# Altium footprint library PcbLib1.PcbLib: 24 footprints (part 1 of 2)
Each footprint in its own frame and in the unit in brackets; x right, y up, seen from the top. Pads: shape width x height; smd on the part's side, far side on the other; paste and mask are expansions set on the pad; w line width, h text height; cw(c..) or ccw(c..) is an arc to the next point about the centre after c.
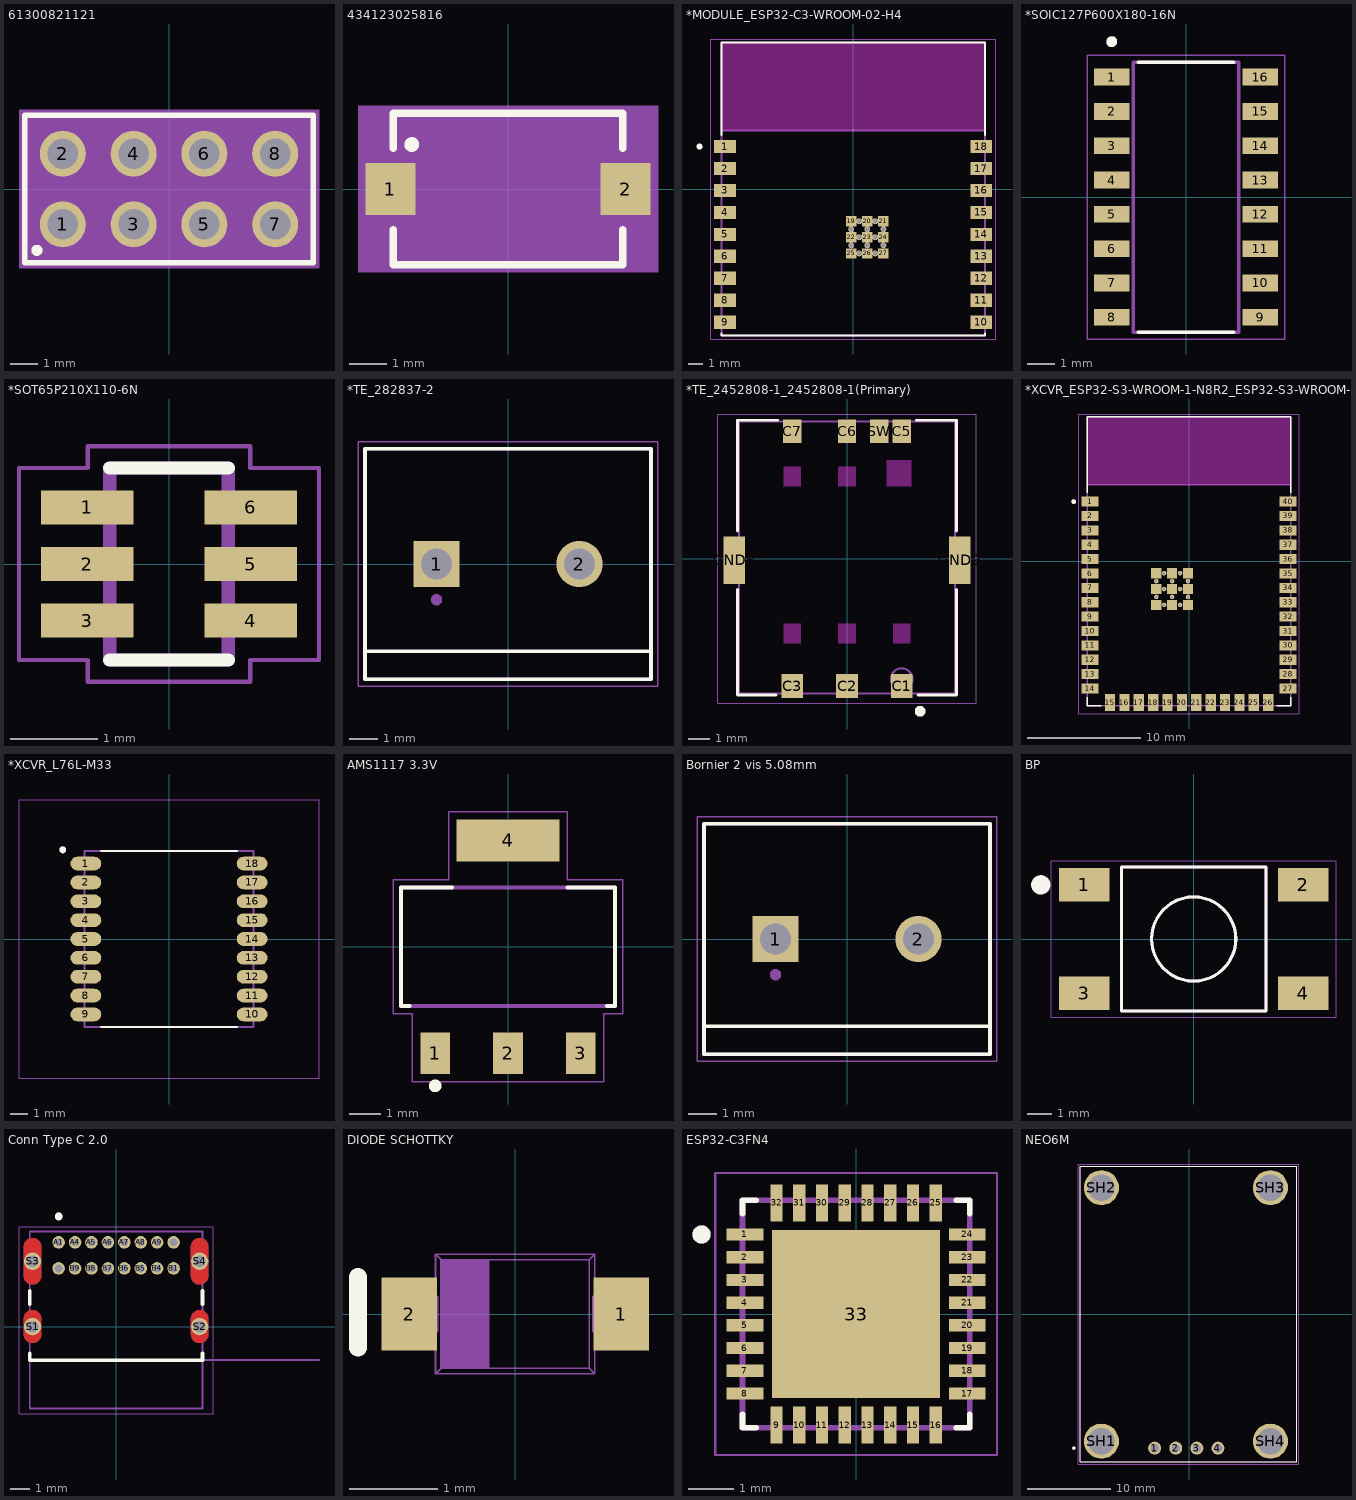
[diagram p0: the footprints below, top view; thin cyan lines are the x and y axes]

## 61300821121 [mm]
pads (8):
  round 1.65 hole 1.1: 1(-3.81,-1.27) 2(-3.81,1.27) 3(-1.27,-1.27) 4(-1.27,1.27) 5(1.27,-1.27) 6(1.27,1.27) 7(3.81,-1.27) 8(3.81,1.27)
Top Overlay:
  circle w0.2: c-4.74,-2.2 r0.1
  lines w0.2: -5.18,-2.64 -5.18,2.64 5.18,2.64 5.18,-2.64 -5.18,-2.64
Mechanical 13:
  lines w0.1: -5.08,-2.54 -5.08,2.54 5.08,2.54 5.08,-2.54 -5.08,-2.54
Mechanical 15:
  region: 5.38,-2.84 -5.38,-2.84 -5.38,2.84 5.38,2.84
3D body "step_temp.STEP": height 8.54, standoff -3, extent -4.953,-2.54 5.207,2.54

## 434123025816 [mm]
pads (2):
  rect 1.35x1.4 smd paste+0 mask+0.102: 1(-3.175,0) 2(3.175,0)
Top Overlay:
  circle w0.2: c-2.6,1.2 r0.1
  lines w0.2: -3.1,-1.1 -3.1,-2.05 3.1,-2.05 3.1,-1.1 ; -3.1,1.1 -3.1,2.05 3.1,2.05 3.1,1.1
Mechanical 13:
  lines w0.1: -3,-1.95 -3,1.95 3,1.95 3,-1.95 -3,-1.95
Mechanical 15:
  region: 4.05,-2.25 -4.05,-2.25 -4.05,2.25 4.05,2.25
3D body "step_temp.STEP": height 2.5, standoff 0, extent -3.5,-1.95 3.5,1.95

## *MODULE_ESP32-C3-WROOM-02-H4 [mm]
pads (39):
  rect 1.5x0.9 smd: 1(-8.75,2.9) 2(-8.75,1.4) 3(-8.75,-0.1) 4(-8.75,-1.6) 5(-8.75,-3.1) 6(-8.75,-4.6) 7(-8.75,-6.1) 8(-8.75,-7.6) 9(-8.75,-9.1) 10(8.75,-9.1) 11(8.75,-7.6) 12(8.75,-6.1) 13(8.75,-4.6) 14(8.75,-3.1) 15(8.75,-1.6) 16(8.75,-0.1) 17(8.75,1.4) 18(8.75,2.9)
  rect 0.7x0.7 smd: 19(-0.14,-2.2) 20(0.96,-2.2) 21(2.06,-2.2) 22(-0.14,-3.3) 23(0.96,-3.3) 24(2.06,-3.3) 25(-0.14,-4.4) 26(0.96,-4.4) 27(2.06,-4.4)
  round 0.4 hole 0.3: 28(0.41,-2.2) 29(1.51,-2.2) 30(-0.14,-2.75) 31(0.96,-2.75) 32(2.06,-2.75) 33(0.41,-3.3) 34(1.51,-3.3) 35(-0.14,-3.85) 36(0.96,-3.85) 37(2.06,-3.85) 38(0.41,-4.4) 39(1.51,-4.4)
Top Overlay:
  circle w0.2: c-10.5,2.9 r0.1
  lines w0.127: -9,-9.87 -9,-10 9,-10 9,-9.87 ; -9,3.67 -9,10 9,10 9,3.67
Keep-Out Layer:
  region: -9,10 9,10 9,4 -9,4
  region: -9,10 9,10 9,4 -9,4
  region: -9,10 9,10 9,4 -9,4
  region: -9,10 9,10 9,4 -9,4
  region: -9,10 9,10 9,4 -9,4
  region: -9,10 9,10 9,4 -9,4
  region: -9,10 9,10 9,4 -9,4
  region: -9,10 9,10 9,4 -9,4
  region: -9,10 9,10 9,4 -9,4
Mechanical 4:
  circle w0.2: c-10.5,2.9 r0.1
  circle w0.2: c-10.5,2.9 r0.1
  lines w0.127: -9,-10 9,-10 ; -9,-10 -9,4 ; -9,-10 9,-10 ; -9,-10 -9,4 ; -9,4 9,4 ; -9,4 -9,10 ; -9,4 9,4 ; -9,4 -9,10 ; -9,10 9,10 ; -9,10 9,10 ; 9,-10 9,4 ; 9,-10 9,4 ; 9,4 9,10 ; 9,4 9,10
Mechanical 16:
  lines w0.05: -9.75,-10.25 9.75,-10.25 9.75,10.25 -9.75,10.25 -9.75,-10.25
3D body "ESP32-C3-WROOM-02-N4--3DModel-STEP-269445.STEP": height 3.35, standoff 0, extent -9,-10 9,10

## *SOIC127P600X180-16N [mm]
pads (16):
  rect 1.31x0.62 smd: 1(-2.75,4.445) 2(-2.75,3.175) 3(-2.75,1.905) 4(-2.75,0.635) 5(-2.75,-0.635) 6(-2.75,-1.905) 7(-2.75,-3.175) 8(-2.75,-4.445) 9(2.75,-4.445) 10(2.75,-3.175) 11(2.75,-1.905) 12(2.75,-0.635) 13(2.75,0.635) 14(2.75,1.905) 15(2.75,3.175) 16(2.75,4.445)
Top Overlay:
  circle w0.2: c-2.75,5.755 r0.1
  lines w0.127: -1.775,-5 1.775,-5 ; -1.775,5 1.775,5
Mechanical 4:
  circle w0.2: c-2.75,5.755 r0.1
  circle w0.2: c-2.75,5.755 r0.1
  lines w0.127: -1.95,-5 1.95,-5 ; -1.95,-5 -1.95,5 ; -1.95,-5 1.95,-5 ; -1.95,-5 -1.95,5 ; -1.95,5 1.95,5 ; -1.95,5 1.95,5 ; 1.95,-5 1.95,5 ; 1.95,-5 1.95,5
Mechanical 16:
  lines w0.05: -3.655,-5.25 3.655,-5.25 3.655,5.25 -3.655,5.25 -3.655,-5.25
3D body "Ch340G--3DModel-STEP-56544.STEP": height 1.8, standoff 0, extent -3,-5 3,5

## *SOT65P210X110-6N [mm]
pads (6):
  rect 1.06x0.39 smd: 1(-0.935,0.65) 2(-0.935,0) 3(-0.935,-0.65) 4(0.935,-0.65) 5(0.935,0) 6(0.935,0.65)
Top Overlay:
  lines w0.152: -0.68,-1.1 0.68,-1.1 ; -0.68,1.1 0.68,1.1
Mechanical 4:
  lines w0.152: -0.68,-1.1 0.68,-1.1 ; -0.68,-1.1 -0.68,1.1 ; -0.68,-1.1 0.68,-1.1 ; -0.68,-1.1 -0.68,1.1 ; -0.68,1.1 0.68,1.1 ; -0.68,1.1 0.68,1.1 ; 0.68,-1.1 0.68,1.1 ; 0.68,-1.1 0.68,1.1
Mechanical 16:
  lines w0.05: -1.72,-1.1 -0.93,-1.1 -0.93,-1.35 0.93,-1.35 0.93,-1.1 1.72,-1.1 1.72,1.1 0.93,1.1 0.93,1.35 -0.93,1.35 -0.93,1.1 -1.72,1.1 -1.72,-1.1
3D body "SMF05CT1G.STEP": height 1.1, standoff 0, extent -1.05,-1 1.05,1

## *TE_282837-2 [mm]
pads (2):
  rect 1.65x1.65 hole 1.1: 1(-2.54,0)
  round 1.65 hole 1.1: 2(2.54,0)
Top Overlay:
  lines w0.127: -5.08,-3.1 -5.08,-4.1 5.08,-4.1 5.08,-3.1 ; -5.08,-3.1 -5.08,4.1 5.08,4.1 5.08,-3.1 ; -5.08,-3.1 5.08,-3.1
Mechanical 4:
  circle w0.2: c-2.54,-1.27 r0.1
  circle w0.2: c-2.54,-1.27 r0.1
  lines w0.127: -5.08,-4.1 5.08,-4.1 ; -5.08,-4.1 -5.08,4.1 ; -5.08,-4.1 5.08,-4.1 ; -5.08,-4.1 -5.08,4.1 ; -5.08,4.1 5.08,4.1 ; -5.08,4.1 5.08,4.1 ; 5.08,-4.1 5.08,4.1 ; 5.08,-4.1 5.08,4.1
Mechanical 16:
  lines w0.05: -5.33,-4.35 5.33,-4.35 5.33,4.35 -5.33,4.35 -5.33,-4.35
3D body "Bornier 2 vis 5.08mm.SLDPRT": height 10.25, standoff -3.25, extent -5.461,-4.191 5.299,4.009

## *TE_2452808-1_2452808-1(Primary) [mm]
pads (9):
  rect 1x1.1 smd: C1(2.54,-5.925) C2(0,-5.925) C3(-2.54,-5.925)
  rect 0.85x1.1 smd: C5(2.54,5.925) C6(0,5.925) C7(-2.54,5.925) SW(1.5,5.925)
  rect 1x2.2 smd: GND8(-5.25,-0.075) GND9(5.25,-0.075)
Top Overlay:
  circle w0.25: c3.4,-7.1 r0.125
  lines w0.127: -5.088,-1.439 -5.088,-6.338 -3.304,-6.338 ; -5.088,1.288 -5.088,6.439 -3.229,6.439 ; 3.229,6.439 5.088,6.439 5.088,1.288 ; 3.304,-6.338 5.088,-6.338 5.088,-1.439
Keep-Out Layer:
  region: -2.94,4.275 -2.14,4.275 -2.14,3.375 -2.94,3.375
  region: -0.4,4.275 0.4,4.275 0.4,3.375 -0.4,3.375
  region: 1.84,4.575 2.99,4.575 2.99,3.375 1.84,3.375
  region: -2.94,-3.025 -2.14,-3.025 -2.14,-3.925 -2.94,-3.925
  region: -0.4,-3.025 0.4,-3.025 0.4,-3.925 -0.4,-3.925
  region: 2.14,-3.025 2.94,-3.025 2.94,-3.925 2.14,-3.925
  region: -2.94,4.275 -2.14,4.275 -2.14,3.375 -2.94,3.375
  region: -0.4,4.275 0.4,4.275 0.4,3.375 -0.4,3.375
  region: 1.84,4.575 2.99,4.575 2.99,3.375 1.84,3.375
  region: -2.94,-3.025 -2.14,-3.025 -2.14,-3.925 -2.94,-3.925
  region: -0.4,-3.025 0.4,-3.025 0.4,-3.925 -0.4,-3.925
  region: 2.14,-3.025 2.94,-3.025 2.94,-3.925 2.14,-3.925
  region: -2.94,4.275 -2.14,4.275 -2.14,3.375 -2.94,3.375
  region: -0.4,4.275 0.4,4.275 0.4,3.375 -0.4,3.375
  region: 1.84,4.575 2.99,4.575 2.99,3.375 1.84,3.375
  region: -2.94,-3.025 -2.14,-3.025 -2.14,-3.925 -2.94,-3.925
  region: -0.4,-3.025 0.4,-3.025 0.4,-3.925 -0.4,-3.925
  region: 2.14,-3.025 2.94,-3.025 2.94,-3.925 2.14,-3.925
  region: -2.94,4.275 -2.14,4.275 -2.14,3.375 -2.94,3.375
  region: -0.4,4.275 0.4,4.275 0.4,3.375 -0.4,3.375
  region: 1.84,4.575 2.99,4.575 2.99,3.375 1.84,3.375
  region: -2.94,-3.025 -2.14,-3.025 -2.14,-3.925 -2.94,-3.925
  region: -0.4,-3.025 0.4,-3.025 0.4,-3.925 -0.4,-3.925
  region: 2.14,-3.025 2.94,-3.025 2.94,-3.925 2.14,-3.925
  region: -2.94,4.275 -2.14,4.275 -2.14,3.375 -2.94,3.375
  region: -0.4,4.275 0.4,4.275 0.4,3.375 -0.4,3.375
  region: 1.84,4.575 2.99,4.575 2.99,3.375 1.84,3.375
  region: -2.94,-3.025 -2.14,-3.025 -2.14,-3.925 -2.94,-3.925
  region: -0.4,-3.025 0.4,-3.025 0.4,-3.925 -0.4,-3.925
  region: 2.14,-3.025 2.94,-3.025 2.94,-3.925 2.14,-3.925
  region: -2.94,4.275 -2.14,4.275 -2.14,3.375 -2.94,3.375
  region: -0.4,4.275 0.4,4.275 0.4,3.375 -0.4,3.375
  region: 1.84,4.575 2.99,4.575 2.99,3.375 1.84,3.375
  region: -2.94,-3.025 -2.14,-3.025 -2.14,-3.925 -2.94,-3.925
  region: -0.4,-3.025 0.4,-3.025 0.4,-3.925 -0.4,-3.925
  region: 2.14,-3.025 2.94,-3.025 2.94,-3.925 2.14,-3.925
Mechanical 4:
  circle w0.1: c2.54,-5.6 r0.5
  circle w0.1: c2.54,-5.6 r0.5
  lines w0.1: -5.025,-6.275 5.025,-6.275 ; -5.025,-6.275 -5.025,6.375 ; -5.025,-6.275 5.025,-6.275 ; -5.025,-6.275 -5.025,6.375 ; -5.025,6.375 5.025,6.375 ; -5.025,6.375 5.025,6.375 ; 5.025,-6.275 5.025,6.375 ; 5.025,-6.275 5.025,6.375
Mechanical 16:
  lines w0.05: -6,-6.725 -6,6.725 6,6.725 6,-6.725 -6,-6.725
3D body "Slot Nano SIM.zip.STEP": height 1.37, standoff 0, extent -5.425,-5.869 5.425,6.581

## *XCVR_ESP32-S3-WROOM-1-N8R2_ESP32-S3-WROOM-1-N8R2(Primary) [mm]
pads (61):
  rect 1.5x0.9 smd: 1(-8.75,5.26) 2(-8.75,3.99) 3(-8.75,2.72) 4(-8.75,1.45) 5(-8.75,0.18) 6(-8.75,-1.09) 7(-8.75,-2.36) 8(-8.75,-3.63) 9(-8.75,-4.9) 10(-8.75,-6.17) 11(-8.75,-7.44) 12(-8.75,-8.71) 13(-8.75,-9.98) 14(-8.75,-11.25) 27(8.75,-11.25) 28(8.75,-9.98) 29(8.75,-8.71) 30(8.75,-7.44) 31(8.75,-6.17) 32(8.75,-4.9) 33(8.75,-3.63) 34(8.75,-2.36) 35(8.75,-1.09) 36(8.75,0.18) 37(8.75,1.45) 38(8.75,2.72) 39(8.75,3.99) 40(8.75,5.26)
  rect 0.9x1.5 smd: 15(-6.985,-12.5) 16(-5.715,-12.5) 17(-4.445,-12.5) 18(-3.175,-12.5) 19(-1.905,-12.5) 20(-0.635,-12.5) 21(0.635,-12.5) 22(1.905,-12.5) 23(3.175,-12.5) 24(4.445,-12.5) 25(5.715,-12.5) 26(6.985,-12.5)
  rect 0.9x0.9 smd: 41_1(-1.5,-2.46) 41_2(-2.9,-2.46) 41_3(-0.1,-2.46) 41_4(-2.9,-3.86) 41_5(-1.5,-3.86) 41_6(-0.1,-3.86) 41_7(-2.9,-1.06) 41_8(-1.5,-1.06) 41_9(-0.1,-1.06)
  round 0.4 hole 0.2: 41_10(-1.5,-1.76) 41_11(-2.9,-1.76) 41_12(-0.1,-1.76) 41_13(-2.9,-3.16) 41_14(-1.5,-3.16) 41_15(-0.1,-3.16) 41_16(-2.2,-1.06) 41_17(-0.8,-1.06) 41_18(-2.2,-2.46) 41_19(-0.8,-2.46) 41_20(-2.2,-3.86) 41_21(-0.8,-3.86)
Top Overlay:
  circle w0.2: c-10.2,5.26 r0.1
  lines w0.127: -9,-12.02 -9,-12.75 -7.755,-12.75 ; -9,6.03 -9,12.75 9,12.75 9,6.03 ; 7.755,-12.75 9,-12.75 9,-12.02
Keep-Out Layer:
  region: -9,12.75 9,12.75 9,6.75 -9,6.75
  region: -9,12.75 9,12.75 9,6.75 -9,6.75
  region: -9,12.75 9,12.75 9,6.75 -9,6.75
  region: -9,12.75 9,12.75 9,6.75 -9,6.75
  region: -9,12.75 9,12.75 9,6.75 -9,6.75
  region: -9,12.75 9,12.75 9,6.75 -9,6.75
  region: -9,12.75 9,12.75 9,6.75 -9,6.75
  region: -9,12.75 9,12.75 9,6.75 -9,6.75
  region: -9,12.75 9,12.75 9,6.75 -9,6.75
Mechanical 4:
  circle w0.2: c-10.2,5.26 r0.1
  circle w0.2: c-10.2,5.26 r0.1
  lines w0.127: -9,-12.75 -9,6.75 ; -9,-12.75 9,-12.75 ; -9,-12.75 -9,6.75 ; -9,-12.75 9,-12.75 ; -9,6.75 9,6.75 ; -9,6.75 -9,12.75 ; -9,6.75 9,6.75 ; -9,6.75 -9,12.75 ; -9,12.75 9,12.75 ; -9,12.75 9,12.75 ; 9,-12.75 9,6.75 ; 9,-12.75 9,6.75 ; 9,6.75 9,12.75 ; 9,6.75 9,12.75
  text "ANTENNA" at -4.5,9.25 h1.88
  text "ANTENNA" at -4.5,9.25 h1.88
Mechanical 16:
  lines w0.05: -9.75,-13.5 9.75,-13.5 9.75,13 -9.75,13 -9.75,-13.5
3D body "ESP32-S3-WROOM-1-N8R2--3DModel-STEP-56544.STEP": height 3.25, standoff 0, extent -9,-12.75 9,12.75

## *XCVR_L76L-M33 [mm]
pads (18):
  oval 1.8x0.8 smd: 1(-4.85,4.4) 2(-4.85,3.3) 3(-4.85,2.2) 4(-4.85,1.1) 5(-4.85,0) 6(-4.85,-1.1) 7(-4.85,-2.2) 8(-4.85,-3.3) 9(-4.85,-4.4) 10(4.85,-4.4) 11(4.85,-3.3) 12(4.85,-2.2) 13(4.85,-1.1) 14(4.85,0) 15(4.85,1.1) 16(4.85,2.2) 17(4.85,3.3) 18(4.85,4.4)
Top Overlay:
  circle w0.2: c-6.2,5.2 r0.1
  lines w0.127: -3.95,-5.125 3.95,-5.125 ; -3.95,5.125 3.95,5.125
Top Paste:
  drawing of 18 lines, arcs and shapes, not listed
Mechanical 4:
  circle w0.2: c-6.2,5.2 r0.1
  circle w0.2: c-6.2,5.2 r0.1
  lines w0.127: -4.925,-5.125 -4.925,5.125 ; -4.925,-5.125 4.925,-5.125 ; -4.925,-5.125 -4.925,5.125 ; -4.925,-5.125 4.925,-5.125 ; -4.925,5.125 4.925,5.125 ; -4.925,5.125 4.925,5.125 ; 4.925,-5.125 4.925,5.125 ; 4.925,-5.125 4.925,5.125
Mechanical 16:
  lines w0.05: -8.75,-8.125 8.75,-8.125 8.75,8.125 -8.75,8.125 -8.75,-8.125
3D body "L76L-M33.STEP": height 2.49, standoff 0, extent -4.85,-5.05 4.85,5.05

## AMS1117 3.3V [mm]
pads (4):
  rect 0.93x1.31 smd: 1(-2.29,-3.345) 2(0,-3.345) 3(2.29,-3.345)
  rect 3.24x1.31 smd: 4(0,3.345)
Top Overlay:
  circle w0.2: c-2.29,-4.373 r0.1
  lines w0.127: -3.1,-1.86 -3.36,-1.86 -3.36,1.86 -1.76,1.86 ; 1.87,1.86 3.36,1.86 3.36,-1.86 3.11,-1.86
Mechanical 4:
  lines w0.127: -3.36,-1.86 -3.36,1.86 ; -3.36,-1.86 3.36,-1.86 ; -3.36,-1.86 -3.36,1.86 ; -3.36,-1.86 3.36,-1.86 ; -3.36,1.86 3.36,1.86 ; -3.36,1.86 3.36,1.86 ; 3.36,-1.86 3.36,1.86 ; 3.36,-1.86 3.36,1.86
Mechanical 16:
  lines w0.05: -3.61,-2.11 -3.61,2.11 -1.87,2.11 -1.87,4.25 1.87,4.25 1.87,2.11 3.61,2.11 3.61,-2.11 3.01,-2.11 3.01,-4.25 -3.01,-4.25 -3.01,-2.11 -3.61,-2.11
3D body "AMS1117-3.3 (1).STEP": height 1.8, standoff 0, extent -3.15,-3.5 3.15,3.5

## Bornier 2 vis 5.08mm [mm]
pads (2):
  rect 1.65x1.65 hole 1.1: 1(-2.54,0)
  round 1.65 hole 1.1: 2(2.54,0)
Top Overlay:
  lines w0.127: -5.08,-3.1 5.08,-3.1 ; -5.08,-3.1 -5.08,4.1 5.08,4.1 5.08,-3.1 ; -5.08,-3.1 -5.08,-4.1 5.08,-4.1 5.08,-3.1
Mechanical 4:
  circle w0.2: c-2.54,-1.27 r0.1
  circle w0.2: c-2.54,-1.27 r0.1
  lines w0.127: -5.08,-4.1 -5.08,4.1 ; -5.08,-4.1 5.08,-4.1 ; -5.08,-4.1 -5.08,4.1 ; -5.08,-4.1 5.08,-4.1 ; -5.08,4.1 5.08,4.1 ; -5.08,4.1 5.08,4.1 ; 5.08,-4.1 5.08,4.1 ; 5.08,-4.1 5.08,4.1
Mechanical 16:
  lines w0.05: -5.33,-4.35 -5.33,4.35 5.33,4.35 5.33,-4.35 -5.33,-4.35
3D body "Bornier 2 vis 5.08mm.SLDPRT": height 10.25, standoff -3.25, extent -5.461,-4.191 5.299,4.009

## BP [mm]
pads (4):
  rect 2.1x1.4 smd: 1(-4.55,2.25) 2(4.55,2.25) 3(-4.55,-2.25) 4(4.55,-2.25)
Top Overlay:
  circle w0.127: c0,0 r1.75
  circle w0.4: c-6.35,2.25 r0.2
  lines w0.127: -3,-2.997 -3,3 3,3 3,-3 -2.992,-3
Mechanical 4:
  circle w0.127: c0,0 r1.75
  circle w0.127: c0,0 r1.75
  lines w0.127: -3,-3 3,-3 ; -3,-3 -3,3 ; -3,-3 3,-3 ; -3,-3 -3,3 ; -3,3 3,3 ; -3,3 3,3 ; 3,-3 3,3 ; 3,-3 3,3
Mechanical 16:
  lines w0.05: -5.914,-3.25 5.914,-3.25 5.914,3.25 -5.914,3.25 -5.914,-3.25
3D body "4-1437565-1--3DModel-STEP-56544.STEP": height 5.38, standoff 0, extent -5.047,-3 4.953,3

## Conn Type C 2.0 [mm] "*GCT_USB4085-GF-A_REVA4_USB4085-GF-A_REVA4(Primary)"
pads (20):
  round 0.65 hole 0.4: A1(-2.975,4.36) A4(-2.125,4.36) A5(-1.275,4.36) A6(-0.425,4.36) A7(0.425,4.36) A8(1.275,4.36) A9(2.125,4.36) A12(2.975,4.36) B1(2.975,3.01) B4(2.125,3.01) B5(1.275,3.01) B6(0.425,3.01) B7(-0.425,3.01) B8(-1.275,3.01) B9(-2.125,3.01) B12(-2.975,3.01)
  round 0.9 hole 0.6: S1(-4.325,0) S2(4.325,0) S3(-4.325,3.38) S4(4.325,3.38)
Top Layer:
  region: 4.775,4.13 4.775,2.63 4.774,2.606 4.773,2.583 4.769,2.56 4.765,2.536 4.76,2.514 4.753,2.491 4.745,2.469 4.736,2.447 4.726,2.426 4.715,2.405 4.702,2.385 4.689,2.365 4.675,2.347 4.659,2.329 4.643,2.312 4.626,2.296 4.608,2.28 4.59,2.266 4.57,2.253 4.55,2.24 4.529,2.229 4.508,2.219 4.486,2.21 4.464,2.202 4.441,2.195 4.419,2.19 4.395,2.186 4.372,2.182 4.349,2.181 4.325,2.18 4.301,2.181 4.278,2.182 4.255,2.186 4.231,2.19 4.209,2.195 4.186,2.202 4.164,2.21 4.142,2.219 4.121,2.229 4.1,2.24 4.08,2.253 4.06,2.266 4.042,2.28 4.024,2.296 4.007,2.312 3.991,2.329 3.975,2.347 3.961,2.365 3.948,2.385 3.935,2.405 3.924,2.426 3.914,2.447 3.905,2.469 3.897,2.491 3.89,2.514 3.885,2.536 3.881,2.56 3.877,2.583 3.876,2.606 3.875,2.63 3.875,4.13 3.876,4.154 3.877,4.177 3.881,4.2 3.885,4.224 3.89,4.246 3.897,4.269 3.905,4.291 3.914,4.313 3.924,4.334 3.935,4.355 3.948,4.375 3.961,4.394 3.975,4.413 3.991,4.431 4.007,4.448 4.024,4.464 4.042,4.48 4.06,4.494 4.08,4.507 4.1,4.52 4.121,4.531 4.142,4.541 4.164,4.55 4.186,4.558 4.209,4.565 4.231,4.57 4.255,4.574 4.278,4.578 4.301,4.579 4.325,4.58 4.349,4.579 4.372,4.578 4.395,4.574 4.419,4.57 4.441,4.565 4.464,4.558 4.486,4.55 4.508,4.541 4.529,4.531 4.55,4.52 4.57,4.507 4.59,4.494 4.608,4.48 4.626,4.464 4.643,4.448 4.659,4.431 4.675,4.413 4.689,4.394 4.702,4.375 4.715,4.355 4.726,4.334 4.736,4.313 4.745,4.291 4.753,4.269 4.76,4.246 4.765,4.224 4.769,4.2 4.773,4.177 4.774,4.154
  region: -3.875,4.13 -3.875,2.63 -3.876,2.606 -3.877,2.583 -3.881,2.56 -3.885,2.536 -3.89,2.514 -3.897,2.491 -3.905,2.469 -3.914,2.447 -3.924,2.426 -3.935,2.405 -3.948,2.385 -3.961,2.365 -3.975,2.347 -3.991,2.329 -4.007,2.312 -4.024,2.296 -4.042,2.28 -4.06,2.266 -4.08,2.253 -4.1,2.24 -4.121,2.229 -4.142,2.219 -4.164,2.21 -4.186,2.202 -4.209,2.195 -4.231,2.19 -4.255,2.186 -4.278,2.182 -4.301,2.181 -4.325,2.18 -4.349,2.181 -4.372,2.182 -4.395,2.186 -4.419,2.19 -4.441,2.195 -4.464,2.202 -4.486,2.21 -4.508,2.219 -4.529,2.229 -4.55,2.24 -4.57,2.253 -4.59,2.266 -4.608,2.28 -4.626,2.296 -4.643,2.312 -4.659,2.329 -4.675,2.347 -4.689,2.365 -4.702,2.385 -4.715,2.405 -4.726,2.426 -4.736,2.447 -4.745,2.469 -4.753,2.491 -4.76,2.514 -4.765,2.536 -4.769,2.56 -4.773,2.583 -4.774,2.606 -4.775,2.63 -4.775,4.13 -4.774,4.154 -4.773,4.177 -4.769,4.2 -4.765,4.224 -4.76,4.246 -4.753,4.269 -4.745,4.291 -4.736,4.313 -4.726,4.334 -4.715,4.355 -4.702,4.375 -4.689,4.394 -4.675,4.413 -4.659,4.431 -4.643,4.448 -4.626,4.464 -4.608,4.48 -4.59,4.494 -4.57,4.507 -4.55,4.52 -4.529,4.531 -4.508,4.541 -4.486,4.55 -4.464,4.558 -4.441,4.565 -4.419,4.57 -4.395,4.574 -4.372,4.578 -4.349,4.579 -4.325,4.58 -4.301,4.579 -4.278,4.578 -4.255,4.574 -4.231,4.57 -4.209,4.565 -4.186,4.558 -4.164,4.55 -4.142,4.541 -4.121,4.531 -4.1,4.52 -4.08,4.507 -4.06,4.494 -4.042,4.48 -4.024,4.464 -4.007,4.448 -3.991,4.431 -3.975,4.413 -3.961,4.394 -3.948,4.375 -3.935,4.355 -3.924,4.334 -3.914,4.313 -3.905,4.291 -3.897,4.269 -3.89,4.246 -3.885,4.224 -3.881,4.2 -3.877,4.177 -3.876,4.154
  region: 4.775,0.4 4.775,-0.4 4.774,-0.424 4.773,-0.447 4.769,-0.47 4.765,-0.494 4.76,-0.516 4.753,-0.539 4.745,-0.561 4.736,-0.583 4.726,-0.604 4.715,-0.625 4.702,-0.645 4.689,-0.665 4.675,-0.683 4.659,-0.701 4.643,-0.718 4.626,-0.734 4.608,-0.75 4.59,-0.764 4.57,-0.777 4.55,-0.79 4.529,-0.801 4.508,-0.811 4.486,-0.82 4.464,-0.828 4.441,-0.835 4.419,-0.84 4.395,-0.844 4.372,-0.848 4.349,-0.849 4.325,-0.85 4.301,-0.849 4.278,-0.848 4.255,-0.844 4.231,-0.84 4.209,-0.835 4.186,-0.828 4.164,-0.82 4.142,-0.811 4.121,-0.801 4.1,-0.79 4.08,-0.777 4.06,-0.764 4.042,-0.75 4.024,-0.734 4.007,-0.718 3.991,-0.701 3.975,-0.683 3.961,-0.665 3.948,-0.645 3.935,-0.625 3.924,-0.604 3.914,-0.583 3.905,-0.561 3.897,-0.539 3.89,-0.516 3.885,-0.494 3.881,-0.47 3.877,-0.447 3.876,-0.424 3.875,-0.4 3.875,0.4 3.876,0.424 3.877,0.447 3.881,0.47 3.885,0.494 3.89,0.516 3.897,0.539 3.905,0.561 3.914,0.583 3.924,0.604 3.935,0.625 3.948,0.645 3.961,0.665 3.975,0.683 3.991,0.701 4.007,0.718 4.024,0.734 4.042,0.75 4.06,0.764 4.08,0.777 4.1,0.79 4.121,0.801 4.142,0.811 4.164,0.82 4.186,0.828 4.209,0.835 4.231,0.84 4.255,0.844 4.278,0.848 4.301,0.849 4.325,0.85 4.349,0.849 4.372,0.848 4.395,0.844 4.419,0.84 4.441,0.835 4.464,0.828 4.486,0.82 4.508,0.811 4.529,0.801 4.55,0.79 4.57,0.777 4.59,0.764 4.608,0.75 4.626,0.734 4.643,0.718 4.659,0.701 4.675,0.683 4.689,0.665 4.702,0.645 4.715,0.625 4.726,0.604 4.736,0.583 4.745,0.561 4.753,0.539 4.76,0.516 4.765,0.494 4.769,0.47 4.773,0.447 4.774,0.424
  region: -3.875,0.4 -3.875,-0.4 -3.876,-0.424 -3.877,-0.447 -3.881,-0.47 -3.885,-0.494 -3.89,-0.516 -3.897,-0.539 -3.905,-0.561 -3.914,-0.583 -3.924,-0.604 -3.935,-0.625 -3.948,-0.645 -3.961,-0.665 -3.975,-0.683 -3.991,-0.701 -4.007,-0.718 -4.024,-0.734 -4.042,-0.75 -4.06,-0.764 -4.08,-0.777 -4.1,-0.79 -4.121,-0.801 -4.142,-0.811 -4.164,-0.82 -4.186,-0.828 -4.209,-0.835 -4.231,-0.84 -4.255,-0.844 -4.278,-0.848 -4.301,-0.849 -4.325,-0.85 -4.349,-0.849 -4.372,-0.848 -4.395,-0.844 -4.419,-0.84 -4.441,-0.835 -4.464,-0.828 -4.486,-0.82 -4.508,-0.811 -4.529,-0.801 -4.55,-0.79 -4.57,-0.777 -4.59,-0.764 -4.608,-0.75 -4.626,-0.734 -4.643,-0.718 -4.659,-0.701 -4.675,-0.683 -4.689,-0.665 -4.702,-0.645 -4.715,-0.625 -4.726,-0.604 -4.736,-0.583 -4.745,-0.561 -4.753,-0.539 -4.76,-0.516 -4.765,-0.494 -4.769,-0.47 -4.773,-0.447 -4.774,-0.424 -4.775,-0.4 -4.775,0.4 -4.774,0.424 -4.773,0.447 -4.769,0.47 -4.765,0.494 -4.76,0.516 -4.753,0.539 -4.745,0.561 -4.736,0.583 -4.726,0.604 -4.715,0.625 -4.702,0.645 -4.689,0.665 -4.675,0.683 -4.659,0.701 -4.643,0.718 -4.626,0.734 -4.608,0.75 -4.59,0.764 -4.57,0.777 -4.55,0.79 -4.529,0.801 -4.508,0.811 -4.486,0.82 -4.464,0.828 -4.441,0.835 -4.419,0.84 -4.395,0.844 -4.372,0.848 -4.349,0.849 -4.325,0.85 -4.301,0.849 -4.278,0.848 -4.255,0.844 -4.231,0.84 -4.209,0.835 -4.186,0.828 -4.164,0.82 -4.142,0.811 -4.121,0.801 -4.1,0.79 -4.08,0.777 -4.06,0.764 -4.042,0.75 -4.024,0.734 -4.007,0.718 -3.991,0.701 -3.975,0.683 -3.961,0.665 -3.948,0.645 -3.935,0.625 -3.924,0.604 -3.914,0.583 -3.905,0.561 -3.897,0.539 -3.89,0.516 -3.885,0.494 -3.881,0.47 -3.877,0.447 -3.876,0.424
Bottom Layer:
  region: 3.875,4.13 3.875,2.63 3.876,2.606 3.877,2.583 3.881,2.56 3.885,2.536 3.89,2.514 3.897,2.491 3.905,2.469 3.914,2.447 3.924,2.426 3.935,2.405 3.948,2.385 3.961,2.365 3.975,2.347 3.991,2.329 4.007,2.312 4.024,2.296 4.042,2.28 4.06,2.266 4.08,2.253 4.1,2.24 4.121,2.229 4.142,2.219 4.164,2.21 4.186,2.202 4.209,2.195 4.231,2.19 4.255,2.186 4.278,2.182 4.301,2.181 4.325,2.18 4.349,2.181 4.372,2.182 4.395,2.186 4.419,2.19 4.441,2.195 4.464,2.202 4.486,2.21 4.508,2.219 4.529,2.229 4.55,2.24 4.57,2.253 4.59,2.266 4.608,2.28 4.626,2.296 4.643,2.312 4.659,2.329 4.675,2.347 4.689,2.365 4.702,2.385 4.715,2.405 4.726,2.426 4.736,2.447 4.745,2.469 4.753,2.491 4.76,2.514 4.765,2.536 4.769,2.56 4.773,2.583 4.774,2.606 4.775,2.63 4.775,4.13 4.774,4.154 4.773,4.177 4.769,4.2 4.765,4.224 4.76,4.246 4.753,4.269 4.745,4.291 4.736,4.313 4.726,4.334 4.715,4.355 4.702,4.375 4.689,4.394 4.675,4.413 4.659,4.431 4.643,4.448 4.626,4.464 4.608,4.48 4.59,4.494 4.57,4.507 4.55,4.52 4.529,4.531 4.508,4.541 4.486,4.55 4.464,4.558 4.441,4.565 4.419,4.57 4.395,4.574 4.372,4.578 4.349,4.579 4.325,4.58 4.301,4.579 4.278,4.578 4.255,4.574 4.231,4.57 4.209,4.565 4.186,4.558 4.164,4.55 4.142,4.541 4.121,4.531 4.1,4.52 4.08,4.507 4.06,4.494 4.042,4.48 4.024,4.464 4.007,4.448 3.991,4.431 3.975,4.413 3.961,4.394 3.948,4.375 3.935,4.355 3.924,4.334 3.914,4.313 3.905,4.291 3.897,4.269 3.89,4.246 3.885,4.224 3.881,4.2 3.877,4.177 3.876,4.154
  region: -4.775,4.13 -4.775,2.63 -4.774,2.606 -4.773,2.583 -4.769,2.56 -4.765,2.536 -4.76,2.514 -4.753,2.491 -4.745,2.469 -4.736,2.447 -4.726,2.426 -4.715,2.405 -4.702,2.385 -4.689,2.365 -4.675,2.347 -4.659,2.329 -4.643,2.312 -4.626,2.296 -4.608,2.28 -4.59,2.266 -4.57,2.253 -4.55,2.24 -4.529,2.229 -4.508,2.219 -4.486,2.21 -4.464,2.202 -4.441,2.195 -4.419,2.19 -4.395,2.186 -4.372,2.182 -4.349,2.181 -4.325,2.18 -4.301,2.181 -4.278,2.182 -4.255,2.186 -4.231,2.19 -4.209,2.195 -4.186,2.202 -4.164,2.21 -4.142,2.219 -4.121,2.229 -4.1,2.24 -4.08,2.253 -4.06,2.266 -4.042,2.28 -4.024,2.296 -4.007,2.312 -3.991,2.329 -3.975,2.347 -3.961,2.365 -3.948,2.385 -3.935,2.405 -3.924,2.426 -3.914,2.447 -3.905,2.469 -3.897,2.491 -3.89,2.514 -3.885,2.536 -3.881,2.56 -3.877,2.583 -3.876,2.606 -3.875,2.63 -3.875,4.13 -3.876,4.154 -3.877,4.177 -3.881,4.2 -3.885,4.224 -3.89,4.246 -3.897,4.269 -3.905,4.291 -3.914,4.313 -3.924,4.334 -3.935,4.355 -3.948,4.375 -3.961,4.394 -3.975,4.413 -3.991,4.431 -4.007,4.448 -4.024,4.464 -4.042,4.48 -4.06,4.494 -4.08,4.507 -4.1,4.52 -4.121,4.531 -4.142,4.541 -4.164,4.55 -4.186,4.558 -4.209,4.565 -4.231,4.57 -4.255,4.574 -4.278,4.578 -4.301,4.579 -4.325,4.58 -4.349,4.579 -4.372,4.578 -4.395,4.574 -4.419,4.57 -4.441,4.565 -4.464,4.558 -4.486,4.55 -4.508,4.541 -4.529,4.531 -4.55,4.52 -4.57,4.507 -4.59,4.494 -4.608,4.48 -4.626,4.464 -4.643,4.448 -4.659,4.431 -4.675,4.413 -4.689,4.394 -4.702,4.375 -4.715,4.355 -4.726,4.334 -4.736,4.313 -4.745,4.291 -4.753,4.269 -4.76,4.246 -4.765,4.224 -4.769,4.2 -4.773,4.177 -4.774,4.154
  region: 3.875,0.4 3.875,-0.4 3.876,-0.424 3.877,-0.447 3.881,-0.47 3.885,-0.494 3.89,-0.516 3.897,-0.539 3.905,-0.561 3.914,-0.583 3.924,-0.604 3.935,-0.625 3.948,-0.645 3.961,-0.665 3.975,-0.683 3.991,-0.701 4.007,-0.718 4.024,-0.734 4.042,-0.75 4.06,-0.764 4.08,-0.777 4.1,-0.79 4.121,-0.801 4.142,-0.811 4.164,-0.82 4.186,-0.828 4.209,-0.835 4.231,-0.84 4.255,-0.844 4.278,-0.848 4.301,-0.849 4.325,-0.85 4.349,-0.849 4.372,-0.848 4.395,-0.844 4.419,-0.84 4.441,-0.835 4.464,-0.828 4.486,-0.82 4.508,-0.811 4.529,-0.801 4.55,-0.79 4.57,-0.777 4.59,-0.764 4.608,-0.75 4.626,-0.734 4.643,-0.718 4.659,-0.701 4.675,-0.683 4.689,-0.665 4.702,-0.645 4.715,-0.625 4.726,-0.604 4.736,-0.583 4.745,-0.561 4.753,-0.539 4.76,-0.516 4.765,-0.494 4.769,-0.47 4.773,-0.447 4.774,-0.424 4.775,-0.4 4.775,0.4 4.774,0.424 4.773,0.447 4.769,0.47 4.765,0.494 4.76,0.516 4.753,0.539 4.745,0.561 4.736,0.583 4.726,0.604 4.715,0.625 4.702,0.645 4.689,0.665 4.675,0.683 4.659,0.701 4.643,0.718 4.626,0.734 4.608,0.75 4.59,0.764 4.57,0.777 4.55,0.79 4.529,0.801 4.508,0.811 4.486,0.82 4.464,0.828 4.441,0.835 4.419,0.84 4.395,0.844 4.372,0.848 4.349,0.849 4.325,0.85 4.301,0.849 4.278,0.848 4.255,0.844 4.231,0.84 4.209,0.835 4.186,0.828 4.164,0.82 4.142,0.811 4.121,0.801 4.1,0.79 4.08,0.777 4.06,0.764 4.042,0.75 4.024,0.734 4.007,0.718 3.991,0.701 3.975,0.683 3.961,0.665 3.948,0.645 3.935,0.625 3.924,0.604 3.914,0.583 3.905,0.561 3.897,0.539 3.89,0.516 3.885,0.494 3.881,0.47 3.877,0.447 3.876,0.424
  region: -4.775,0.4 -4.775,-0.4 -4.774,-0.424 -4.773,-0.447 -4.769,-0.47 -4.765,-0.494 -4.76,-0.516 -4.753,-0.539 -4.745,-0.561 -4.736,-0.583 -4.726,-0.604 -4.715,-0.625 -4.702,-0.645 -4.689,-0.665 -4.675,-0.683 -4.659,-0.701 -4.643,-0.718 -4.626,-0.734 -4.608,-0.75 -4.59,-0.764 -4.57,-0.777 -4.55,-0.79 -4.529,-0.801 -4.508,-0.811 -4.486,-0.82 -4.464,-0.828 -4.441,-0.835 -4.419,-0.84 -4.395,-0.844 -4.372,-0.848 -4.349,-0.849 -4.325,-0.85 -4.301,-0.849 -4.278,-0.848 -4.255,-0.844 -4.231,-0.84 -4.209,-0.835 -4.186,-0.828 -4.164,-0.82 -4.142,-0.811 -4.121,-0.801 -4.1,-0.79 -4.08,-0.777 -4.06,-0.764 -4.042,-0.75 -4.024,-0.734 -4.007,-0.718 -3.991,-0.701 -3.975,-0.683 -3.961,-0.665 -3.948,-0.645 -3.935,-0.625 -3.924,-0.604 -3.914,-0.583 -3.905,-0.561 -3.897,-0.539 -3.89,-0.516 -3.885,-0.494 -3.881,-0.47 -3.877,-0.447 -3.876,-0.424 -3.875,-0.4 -3.875,0.4 -3.876,0.424 -3.877,0.447 -3.881,0.47 -3.885,0.494 -3.89,0.516 -3.897,0.539 -3.905,0.561 -3.914,0.583 -3.924,0.604 -3.935,0.625 -3.948,0.645 -3.961,0.665 -3.975,0.683 -3.991,0.701 -4.007,0.718 -4.024,0.734 -4.042,0.75 -4.06,0.764 -4.08,0.777 -4.1,0.79 -4.121,0.801 -4.142,0.811 -4.164,0.82 -4.186,0.828 -4.209,0.835 -4.231,0.84 -4.255,0.844 -4.278,0.848 -4.301,0.849 -4.325,0.85 -4.349,0.849 -4.372,0.848 -4.395,0.844 -4.419,0.84 -4.441,0.835 -4.464,0.828 -4.486,0.82 -4.508,0.811 -4.529,0.801 -4.55,0.79 -4.57,0.777 -4.59,0.764 -4.608,0.75 -4.626,0.734 -4.643,0.718 -4.659,0.701 -4.675,0.683 -4.689,0.665 -4.702,0.645 -4.715,0.625 -4.726,0.604 -4.736,0.583 -4.745,0.561 -4.753,0.539 -4.76,0.516 -4.765,0.494 -4.769,0.47 -4.773,0.447 -4.774,0.424
Top Overlay:
  circle w0.2: c-2.975,5.7 r0.1
  lines w0.2: -4.47,-1.39 -4.47,-1.74 4.47,-1.74 4.47,-1.39 ; -4.47,1.17 -4.47,1.85 ; 4.47,1.17 4.47,1.85
Top Solder:
  drawing of 4 lines, arcs and shapes, not listed
Bottom Solder:
  drawing of 4 lines, arcs and shapes, not listed
Mechanical 1:
  lines w0: -4.625,-0.4 ccw(c-4.325,-0.4) -4.325,-0.7 ccw(c-4.325,-0.4) -4.025,-0.4 -4.025,0.4 ccw(c-4.325,0.4) -4.325,0.7 ccw(c-4.325,0.4) -4.625,0.4 -4.625,-0.4 ; -4.625,2.63 ccw(c-4.325,2.63) -4.325,2.33 ccw(c-4.325,2.63) -4.025,2.63 -4.025,4.13 ccw(c-4.325,4.13) -4.325,4.43 ccw(c-4.325,4.13) -4.625,4.13 -4.625,2.63 ; 4.025,-0.4 ccw(c4.325,-0.4) 4.325,-0.7 ccw(c4.325,-0.4) 4.625,-0.4 4.625,0.4 ccw(c4.325,0.4) 4.325,0.7 ccw(c4.325,0.4) 4.025,0.4 4.025,-0.4 ; 4.025,2.63 ccw(c4.325,2.63) 4.325,2.33 ccw(c4.325,2.63) 4.625,2.63 4.625,4.13 ccw(c4.325,4.13) 4.325,4.43 ccw(c4.325,4.13) 4.025,4.13 4.025,2.63
Mechanical 4:
  circle w0.2: c-2.975,5.7 r0.1
  circle w0.2: c-2.975,5.7 r0.1
  lines w0.1: -4.47,-4.25 -4.47,-1.74 ; -4.47,-4.25 4.47,-4.25 ; -4.47,-4.25 -4.47,-1.74 ; -4.47,-4.25 4.47,-4.25 ; -4.47,-1.74 -4.47,4.92 ; -4.47,-1.74 10.5,-1.74 -4.47,-1.74 ; -4.47,-1.74 -4.47,4.92 ; -4.47,4.92 4.47,4.92 ; -4.47,4.92 4.47,4.92 ; 4.47,-4.25 4.47,4.92 ; 4.47,-4.25 4.47,4.92
  text "PCB EDGE" at 5.315,-1.82 h1.88
  text "PCB EDGE" at 5.315,-1.82 h1.88
Mechanical 16:
  lines w0.05: -5.025,-4.5 -5.025,5.17 5.025,5.17 5.025,-4.5 -5.025,-4.5
3D body "usb4085-gf-a.stp": height 3.46, standoff -2.1, extent -4.47,-4.217 4.47,4.953

## DIODE SCHOTTKY [mm] "SOD-323"
pads (2):
  rect 0.63x0.83 smd: 1(1.2,0) 2(-1.2,0)
Top Overlay:
  lines w0.2: -1.778,-0.381 -1.778,0.419
Top Assembly:
  rectangle: -0.839,0.613 -0.3,0.614
  rectangle: -0.838,-0.613 -0.3,-0.613
  region: -0.838,0.613 -0.3,0.613 -0.3,-0.613 -0.838,-0.613
  lines w0.02: -1.157,-0.2 -1.157,0.2 ; -1.11,-0.2 -1.11,0.2 ; -0.91,-0.2 -0.91,0.2 ; -0.9,-0.2 -0.9,-0.675 ; -0.9,0.2 -0.9,0.675 ; 0.9,-0.2 0.9,-0.675 ; 0.9,0.2 0.9,0.675 ; 0.91,-0.2 0.91,0.2 ; 1.11,-0.2 1.11,0.2 ; 1.157,-0.2 1.157,0.2 ; -0.9,-0.675 0.9,-0.675 ; -0.9,-0.675 -0.838,-0.613 ; -0.9,0.675 0.9,0.675 ; -0.9,0.675 -0.838,0.613 ; -0.838,-0.613 -0.3,-0.613 ; -0.838,-0.613 -0.838,0.613 ; -0.838,0.613 -0.3,0.613 ; -0.3,-0.613 0.838,-0.613 ; -0.3,-0.613 -0.3,0.613 ; -0.3,0.613 0.838,0.613 ; 0.838,-0.613 0.9,-0.675 ; 0.838,-0.613 0.838,0.613 ; 0.838,0.613 0.9,0.675 ; -1.3,-0.2 -0.879,-0.2 -0.879,0.2 -1.3,0.2 -1.3,-0.2 ; 0.879,-0.2 0.879,0.2 1.3,0.2 1.3,-0.2 0.879,-0.2
  text "'.Designator'" at 0.3,-0.5 h0.5
3D body "SW3dPS-SOD-323.STEP": height 1.1, standoff 0, extent -1.3,-0.675 1.3,0.675

## ESP32-C3FN4 [mm] "*QFN50P500X500X90-33N"
pads (33):
  rect 0.81x0.27 smd: 1(-2.445,1.75) 2(-2.445,1.25) 3(-2.445,0.75) 4(-2.445,0.25) 5(-2.445,-0.25) 6(-2.445,-0.75) 7(-2.445,-1.25) 8(-2.445,-1.75) 17(2.445,-1.75) 18(2.445,-1.25) 19(2.445,-0.75) 20(2.445,-0.25) 21(2.445,0.25) 22(2.445,0.75) 23(2.445,1.25) 24(2.445,1.75)
  rect 0.27x0.81 smd: 9(-1.75,-2.445) 10(-1.25,-2.445) 11(-0.75,-2.445) 12(-0.25,-2.445) 13(0.25,-2.445) 14(0.75,-2.445) 15(1.25,-2.445) 16(1.75,-2.445) 25(1.75,2.445) 26(1.25,2.445) 27(0.75,2.445) 28(0.25,2.445) 29(-0.25,2.445) 30(-0.75,2.445) 31(-1.25,2.445) 32(-1.75,2.445)
  rect 3.7x3.7 smd: 33(0,0)
Top Overlay:
  circle w0.2: c-3.4,1.75 r0.1
  lines w0.127: -2.5,-2.205 -2.5,-2.5 -2.205,-2.5 ; -2.5,2.205 -2.5,2.5 -2.205,2.5 ; 2.205,-2.5 2.5,-2.5 2.5,-2.205 ; 2.205,2.5 2.5,2.5 2.5,2.205
Top Paste:
  region: -1.17,1.17 1.17,1.17 1.17,-1.17 -1.17,-1.17
Top Solder:
  drawing of 33 lines, arcs and shapes, not listed
Mechanical 4:
  circle w0.2: c-3.4,1.75 r0.1
  circle w0.2: c-3.4,1.75 r0.1
  lines w0.127: -2.5,-2.5 2.5,-2.5 ; -2.5,-2.5 -2.5,2.5 ; -2.5,-2.5 2.5,-2.5 ; -2.5,-2.5 -2.5,2.5 ; -2.5,2.5 2.5,2.5 ; -2.5,2.5 2.5,2.5 ; 2.5,-2.5 2.5,2.5 ; 2.5,-2.5 2.5,2.5
Mechanical 16:
  lines w0.05: -3.1,-3.1 3.1,-3.1 3.1,3.1 -3.1,3.1 -3.1,-3.1
3D body "ESP32-C3FN4.STEP": height 0.9, standoff 0, extent -2.5,-2.5 2.5,2.5

## NEO6M [mm] "*XCVR_ZC323200_ZC323200(Primary)"
pads (8):
  round 1.56 hole 1.04: 1(-4.174,-16.14) 2(-1.634,-16.14) 3(0.906,-16.14) 4(3.446,-16.14)
  round 4.216 hole 3.2: SH1(-10.579,-15.3) SH2(-10.579,15.2) SH3(9.761,15.2) SH4(9.761,-15.3)
Top Overlay:
  circle w0.2: c-13.89,-16.14 r0.1
  lines w0.127: -13.14,-17.8 12.94,-17.8 12.94,17.8 -13.14,17.8 -13.14,-17.8
Mechanical 4:
  circle w0.2: c-13.89,-16.14 r0.1
  circle w0.2: c-13.89,-16.14 r0.1
  lines w0.127: -13.14,-17.8 12.94,-17.8 ; -13.14,-17.8 -13.14,17.8 ; -13.14,-17.8 12.94,-17.8 ; -13.14,-17.8 -13.14,17.8 ; -13.14,17.8 12.94,17.8 ; -13.14,17.8 12.94,17.8 ; 12.94,-17.8 12.94,17.8 ; 12.94,-17.8 12.94,17.8
Mechanical 16:
  lines w0.05: -13.39,-18.05 13.19,-18.05 13.19,18.05 -13.39,18.05 -13.39,-18.05